# Altium schematic symbol library 8520-4500PL.SchLib: 1 symbol
Pins are listed as number, name and electrical type; pins without a type are passive.

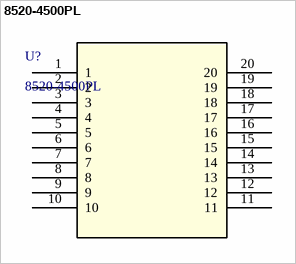
[diagram p0: symbol 8520-4500PL]

## 8520-4500PL
designator U?
Description; Manufacturer_Name: 3M; Copyright: Copyright (C) 2026 Ultra Librarian. All rights reserved.; Manufacturer_Part_Number: 8520-4500PL; RefDes: RefDes; Type: Type
footprint 8520-4500PL_3MM
pins: 1, 2, 3, 4, 5, 6, 7, 8, 9, 10, 11, 12, 13, 14, 15, 16, 17, 18, 19, 20